# Altium footprint library PcbLib.PcbLib: 42 footprints (part 1 of 3)
Each footprint in its own frame and in the unit in brackets; x right, y up, seen from the top. Pads: shape width x height; smd on the part's side, far side on the other; paste and mask are expansions set on the pad; w line width, h text height; cw(c..) or ccw(c..) is an arc to the next point about the centre after c.
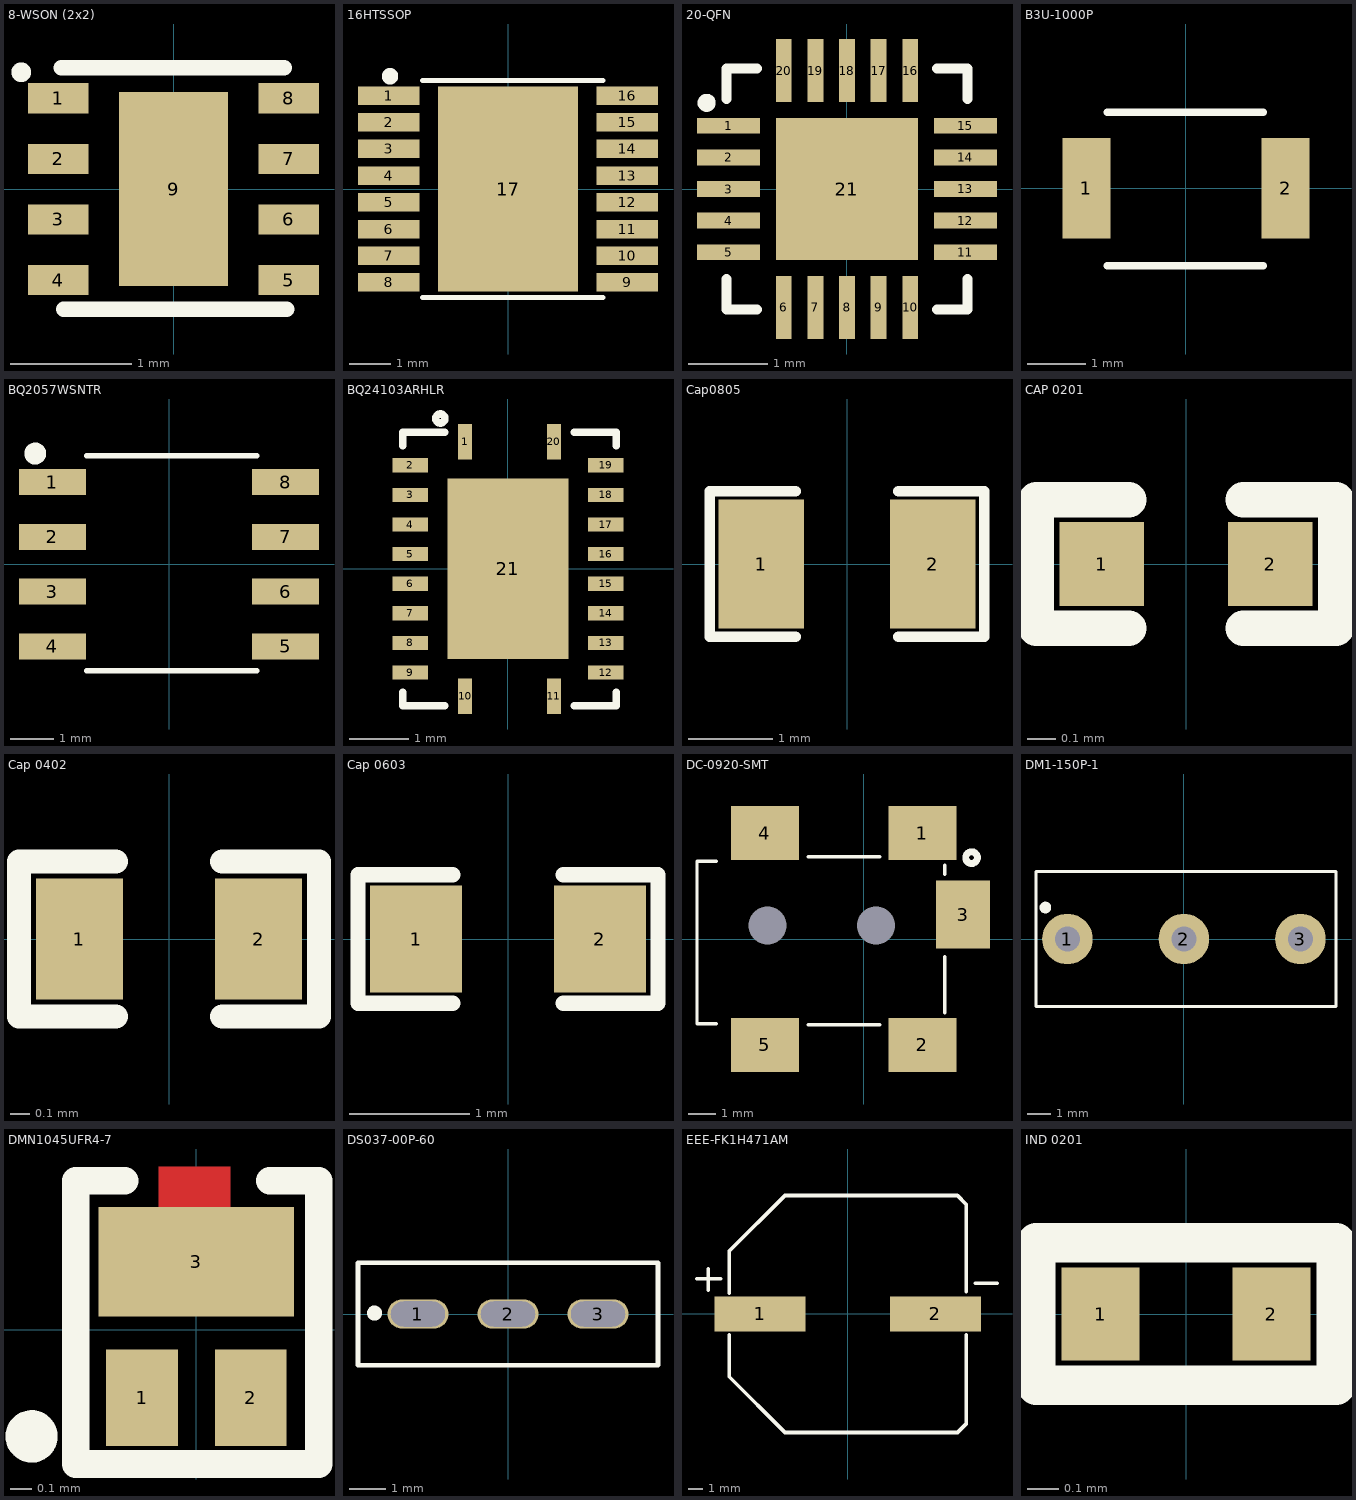
[diagram p0: the footprints below, top view; thin cyan lines are the x and y axes]

## 8-WSON (2x2) [mm] "IC REG BUCK 3.3V 1A 8WSON"
pads (9):
  rect 0.5x0.25 smd: 1(-0.95,0.75) 2(-0.95,0.25) 3(-0.95,-0.25) 4(-0.95,-0.75) 5(0.95,-0.75) 6(0.95,-0.25) 7(0.95,0.25) 8(0.95,0.75)
  rect 0.9x1.6 smd: 9(0,0)
Top Overlay:
  circle w0.127: c-1.257,0.965 r0.018
  lines w0.127: -0.927,1.003 0.914,1.003 ; -0.908,-0.991 0.933,-0.991
3D body "TPS62162DSGR.STEP": height 0.8, standoff 0, extent -1,-1 1,1

## 16HTSSOP [mm]
pads (17):
  rect 1.5x0.45 smd: 1(-2.9,2.275) 2(-2.9,1.625) 3(-2.9,0.975) 4(-2.9,0.325) 5(-2.9,-0.325) 6(-2.9,-0.975) 7(-2.9,-1.625) 8(-2.9,-2.275) 9(2.9,-2.275) 10(2.9,-1.625) 11(2.9,-0.975) 12(2.9,-0.325) 13(2.9,0.325) 14(2.9,0.975) 15(2.9,1.625) 16(2.9,2.275)
  rect 3.4x5 smd: 17(0,0)
Top Overlay:
  circle w0.254: c-2.87,2.743 r0.072
  lines w0.127: -2.083,-2.642 2.311,-2.642 ; -2.083,2.642 2.311,2.642
3D body "DRV8876PWPR.STEP": height 1.2, standoff 0, extent -3.2,-2.5 3.2,2.5

## 20-QFN [mm] "IC MCU 8BIT 16KB FLASH 20VQFN"
pads (21):
  rect 0.8x0.2 smd: 1(-1.5,0.8) 2(-1.5,0.4) 3(-1.5,0) 4(-1.5,-0.4) 5(-1.5,-0.8) 11(1.5,-0.8) 12(1.5,-0.4) 13(1.5,0) 14(1.5,0.4) 15(1.5,0.8)
  rect 0.2x0.8 smd: 6(-0.8,-1.5) 7(-0.4,-1.5) 8(0,-1.5) 9(0.4,-1.5) 10(0.8,-1.5) 16(0.8,1.5) 17(0.4,1.5) 18(0,1.5) 19(-0.4,1.5) 20(-0.8,1.5)
  rect 1.8x1.8 smd: 21(0,0)
Top Overlay:
  circle w0.127: c-1.778,1.092 r0.051
  lines w0.127: -1.524,-1.143 -1.524,-1.524 -1.143,-1.524 ; -1.524,1.143 -1.524,1.524 -1.143,1.524 ; 1.143,-1.524 1.524,-1.524 1.524,-1.143 ; 1.143,1.524 1.524,1.524 1.524,1.143
3D body "VQFN20_3X3_MCH.step": height 0.59, standoff 0, extent -1.499,-1.499 1.499,1.499

## B3U-1000P [mm] "SWITCH TACTILE SPST-NO 0.05A 12V"
pads (2):
  rect 0.82x1.72 smd: 1(-1.7,0) 2(1.7,0)
Top Overlay:
  lines w0.127: -1.346,-1.321 0,-1.321 1.321,-1.321 ; -1.346,1.295 0,1.295 1.321,1.295
3D body "User Library-OMRON B3U1000P.step": height 1.6, standoff 0, extent -2,-1.263 2,1.237

## BQ2057WSNTR [mm]
pads (8):
  rect 1.55x0.6 smd: 1(-2.7,1.905) 2(-2.7,0.635) 3(-2.7,-0.635) 4(-2.7,-1.905) 5(2.7,-1.905) 6(2.7,-0.635) 7(2.7,0.635) 8(2.7,1.905)
Top Overlay:
  circle w0.254: c-3.099,2.565 r0.127
  lines w0.127: -1.905,-2.464 2.032,-2.464 ; -1.905,2.515 2.032,2.515
3D body "User Library-SOIC-8-1.STEP": height 1.65, standoff -0.1, extent -3,-2.45 3,2.45

## BQ24103ARHLR [mm]
pads (21):
  rect 0.24x0.6 smd: 1(-0.725,2.15) 10(-0.725,-2.15) 11(0.775,-2.15) 20(0.775,2.15)
  rect 0.6x0.24 smd: 2(-1.65,1.75) 3(-1.65,1.25) 4(-1.65,0.75) 5(-1.65,0.25) 6(-1.65,-0.25) 7(-1.65,-0.75) 8(-1.65,-1.25) 9(-1.65,-1.75) 12(1.65,-1.75) 13(1.65,-1.25) 14(1.65,-0.75) 15(1.65,-0.25) 16(1.65,0.25) 17(1.65,0.75) 18(1.65,1.25) 19(1.65,1.75)
  rect 2.05x3.05 smd: 21(0,0)
Top Overlay:
  circle w0.127: c-1.143,2.54 r0.076
  lines w0.127: -1.778,-2.083 -1.778,-2.311 -1.067,-2.311 ; -1.778,2.083 -1.778,2.311 -1.067,2.311 ; 1.118,-2.311 1.829,-2.311 1.829,-2.083 ; 1.118,2.311 1.829,2.311 1.829,2.083
3D body "User Library-20-VQFN (3_5x4_5).step": height 0.88, standoff -0.02, extent -1.735,-2.259 1.785,2.261

## Cap0805 [mil] "SMD 0805"
pads (2):
  rect 40x60 smd mask+2.76: 1(-40,0) 2(40,0)
Top Overlay:
  lines w5: -24,-34 -64,-34 -64,34 -24,34 ; 24,-34 64,-34 64,34 24,34
3D body "User Library-0805 SMD Capacitor.step": height 30, standoff -0.79, extent -39.36,-24.6 39.38,24.61

## CAP 0201 [mm]
pads (2):
  rect 0.3x0.3 smd mask+0.055: 1(-0.3,0) 2(0.3,0)
Top Overlay:
  lines w0.127: -0.203,-0.229 -0.533,-0.229 -0.533,0.229 -0.203,0.229 ; 0.203,-0.229 0.533,-0.229 0.533,0.229 0.203,0.229
3D body "User Library-SMD Ceramic Capacitors_0201 (0603)_AB.STEP": height 0.28, standoff -0.02, extent -0.3,-0.15 0.301,0.15

## Cap 0402 [mil]
pads (2):
  rect 18x25 smd mask+2.36: 1(-18.5,0) 2(18.5,0)
Top Overlay:
  lines w5: -11,-16 -31,-16 -31,16 -11,16 ; 11,-16 31,-16 31,16 11,16
3D body "User Library-Capacitor 0402.step": height 18.5, standoff -1.18, extent -19.68,-9.84 19.7,9.85

## Cap 0603 [mil]
pads (2):
  rect 30x35 smd mask+2.36: 1(-30,0) 2(30,0)
Top Overlay:
  lines w5: -18,-21 -49,-21 -49,21 -18,21 ; 18,-21 49,-21 49,21 18,21
3D body "User Library-CAPC1608X09.step": height 34.25, standoff -1.18, extent -31.51,-15.75 31.49,15.74

## DC-0920-SMT [mm]
pads (7):
  rect 2.5x2 smd: 1(2.15,3.9) 2(2.15,-3.9) 4(-3.65,3.9) 5(-3.65,-3.9)
  rect 2x2.5 smd: 3(3.65,0.9)
  round 0 hole 1.4 unplated: 7(0.45,0.5) 8(-3.55,0.5)
Top Overlay:
  circle w0.254: c3.962,2.997 r0.216
  lines w0.127: -5.436,-3.124 -6.147,-3.124 -6.147,2.87 -5.436,2.87 ; -2.057,-3.15 0.584,-3.15 ; -2.057,3.023 0.584,3.023 ; 2.972,-2.718 2.972,-2.388 2.972,-0.66 ; 2.972,2.388 2.972,2.718
3D body "dc-0920-smt.stp": height 4.8, standoff -0.4, extent -6.087,-4.409 4.207,4.191

## DM1-150P-1 [mm]
pads (3):
  round 2.2 hole 1.1: 1(-5.08,0) 2(0,0) 3(5.08,0)
Top Overlay:
  circle w0.254: c-6.045,1.372 r0.127
  lines w0.127: -6.452,-2.946 6.629,-2.946 6.629,2.946 -6.452,2.946 -6.452,-2.946
3D body "dm1-150p-1.stp": height 11.2, standoff -2.8, extent -6.403,-2.896 8.892,2.904

## DMN1045UFR4-7 [mm]
pads (3):
  rect 0.33x0.445 smd: 1(-0.25,-0.312) 2(0.25,-0.312)
  rect 0.9x0.505 smd: 3(0,0.313)
Top Layer:
  rectangle: -0.174,0.551 0.156,0.751
Top Overlay:
  circle w0.127: c-0.758,-0.49 r0.057
  lines w0.127: -0.33,0.686 -0.555,0.686 -0.555,-0.617 0.563,-0.617 0.563,0.686 0.338,0.686
3D body "DFN1010H4-3.stp": height 0.37, standoff -0.02, extent -0.5,-0.373 0.5,0.627

## DS037-00P-60 [mm]
pads (3):
  oval 1.7x0.8 hole 0.7 slot 1.5 at 0 deg: 1(-2.5,0) 2(0,0) 3(2.5,0)
Top Overlay:
  circle w0.254: c-3.708,0.025 r0.08
  lines w0.127: -4.166,-1.422 4.166,-1.422 4.166,1.422 -4.166,1.422 -4.166,-1.422
3D body "ds037-00p-60.stp": height 9.9, standoff -3, extent -4.1,-1.35 4.1,1.35

## EEE-FK1H471AM [mm] "CAP ALUM 470UF 20% 50V SMD"
pads (2):
  rect 6.5x2.5 smd: 1(-6.25,0) 2(6.25,0)
Top Overlay:
  lines w0.254: -10.744,2.489 -9.068,2.489 ; -9.931,1.702 -9.931,3.226 ; -8.458,1.473 -8.458,4.458 -4.476,8.441 7.823,8.441 ; -8.456,-1.49 -8.456,-4.476 -4.473,-8.458 7.826,-8.458 ; 7.826,-8.457 8.462,-7.82 8.462,-1.499 ; 8.46,1.574 8.46,7.803 7.823,8.44 ; 9.093,2.184 10.643,2.184 ; 7.823,8.44 7.823,8.441
3D body "16 SIZE CODE J16.stp": height 16.5, standoff 0, extent -9.2,-8.5 9.2,8.5

## IND 0201 [mm]
pads (2):
  rect 0.25x0.3 smd mask+0.055: 1(-0.275,0) 2(0.275,0)
Top Overlay:
  lines w0.127: -0.483,-0.229 -0.483,0.229 0.483,0.229 0.483,-0.229 -0.483,-0.229
3D body "742692005.stp": height 0.15, standoff -0.15, extent -0.3,-0.15 0.3,0.15